# Altium integrated library WIZ850IO.IntLib: 1 symbol
Pins are listed as number, name and electrical type; pins without a type are passive.

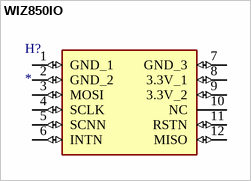
[diagram p0: symbol WIZ850IO]

## WIZ850IO
designator H?
Ethernet - 10/100 Base-T/TX PHY SPI Interface Module; MF: WIZnet; MP: WIZ850IO; Package: Module WIZnet; Price: None; Check_prices: https://www.snapeda.com/parts/WIZ850IO/WIZnet/view-part/?ref=eda; Value: *; SnapEDA_Link: https://www.snapeda.com/parts/WIZ850IO/WIZnet/view-part/?ref=snap; Availability: In Stock; Purchase-URL: https://pricing.snapeda.com/search/part/WIZ850IO/?ref=eda
footprint WIZ850IO
pins: 1 GND_1 (io), 2 GND_2 (io), 3 MOSI (io), 4 SCLK (io), 5 SCNN (io), 6 INTN (io), 7 GND_3 (io), 8 3.3V_1 (io), 9 3.3V_2 (io), 10 NC, 11 RSTN (io), 12 MISO (io)